# Altium integrated library TLV9064IDR.IntLib: 1 symbol
Pins are listed as number, name and electrical type; pins without a type are passive.

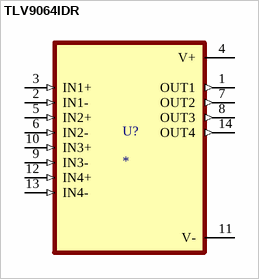
[diagram p0: symbol TLV9064IDR]

## TLV9064IDR
designator U?
Quad, 5.5-V, 10-MHz, RRIO operational amplifier for cost-optimized applications; MF: Texas Instruments; MP: TLV9064IDR; SnapEDA_Link: https://www.snapeda.com/parts/TLV9064IDR/Texas+Instruments/view-part/?ref=snap; Package: SOIC-14 Texas Instruments; Value: *; Check_prices: https://www.snapeda.com/parts/TLV9064IDR/Texas+Instruments/view-part/?ref=eda
footprint SOIC127P600X175-14N
pins: 1 OUT1 (out), 2 IN1- (in), 3 IN1+ (in), 4 V+ (power), 5 IN2+ (in), 6 IN2- (in), 7 OUT2 (out), 8 OUT3 (out), 9 IN3- (in), 10 IN3+ (in), 11 V- (power), 12 IN4+ (in), 13 IN4- (in), 14 OUT4 (out)